# Altium schematic symbol library 57PC5F.SchLib: 1 symbol
Pins are listed as number, name and electrical type; pins without a type are passive.

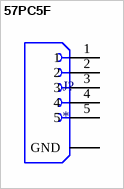
[diagram p0: symbol 57PC5F]

## 57PC5F
designator J?
DIN Receptacle Receptacle 5 Female PCB Mount | Switchcraft 57PC5F; MF: Switchcraft Inc.; SnapEDA_Link: https://www.snapeda.com/parts/57PC5F/SWITCHCRAFT/view-part/?ref=snap; Package: None; Value: *; MP: 57PC5F; Check_prices: https://www.snapeda.com/parts/57PC5F/SWITCHCRAFT/view-part/?ref=eda
footprint SWITCHCRAFT_57PC5F
pins: 1, 2, 3, 4, 5, G1 GND (power), G2 GND (power)